# Altium schematic symbol library C_330uF.SchLib: 1 symbol
Pins are listed as number, name and electrical type; pins without a type are passive.

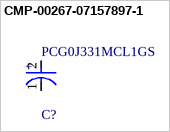
[diagram p0: symbol CMP-00267-07157897-1]

## CMP-00267-07157897-1
designator C?, comment PCG0J331MCL1GS
PCG0J331MCL1GS Cap Aluminum Polymer 330uF 6.3VDC 20% (6.3 X 6mm) SMD 0.023 Ohm 2700mA 2000h 105C Automotive T/R; NexarPartId: 7157897; Voltage: 6.3V; Leakage Current: 416µA; Dissipation Factor: 0.12%; Life (Hours): 2000hours; Ripple Current (AC): 2.7A; ESR (Equivalent Series Resistance): 23mΩ; Capacitance: 330µF; Lifecycle Status: Production; Length: 6mm; Height - Seated (Max): 5.9944mm; Termination: SMD/SMT; Min Operating Temperature: -55°C; Lead Free: Lead Free; Tolerance: 20%; Height: 6mm; Schedule B: 8532220020; Mount: Surface Mount; Max Operating Temperature: 105°C; Packaging: Tape & Reel; Case/Package: Radial; Voltage Rating: 6.3V; Voltage Rating (DC): 6.3V; Ripple Current: 2.7A; Diameter: 6.3mm; RoHS: Compliant; Radiation Hardening: No
footprint FP-PCG0J331MCL1GS-MFG
pins: 1 C, 2 A
text: +